# Altium integrated library LED-1206.IntLib: 1 symbol
Pins are listed as number, name and electrical type; pins without a type are passive.

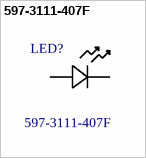
[diagram p0: symbol 597-3111-407F]

## 597-3111-407F
designator LED?
LED RED CLEAR 1206 SMD; MP: 5973111407F; MF: Dialight; Package: 1206 Dialight; SnapEDA_Link: https://www.snapeda.com/parts/5973111407F/Dialight/view-part/?ref=snap; Availability: Unavailable; Price: None; Value: *
footprint *LED_597-3111-407F
pins: 1, 2